# Altium footprint library Footprint_Vlad.PcbLib: 392 footprints (part 21 of 25)
Each footprint in its own frame and in the unit in brackets; x right, y up, seen from the top. Pads: shape width x height; smd on the part's side, far side on the other; paste and mask are expansions set on the pad; w line width, h text height; cw(c..) or ccw(c..) is an arc to the next point about the centre after c.
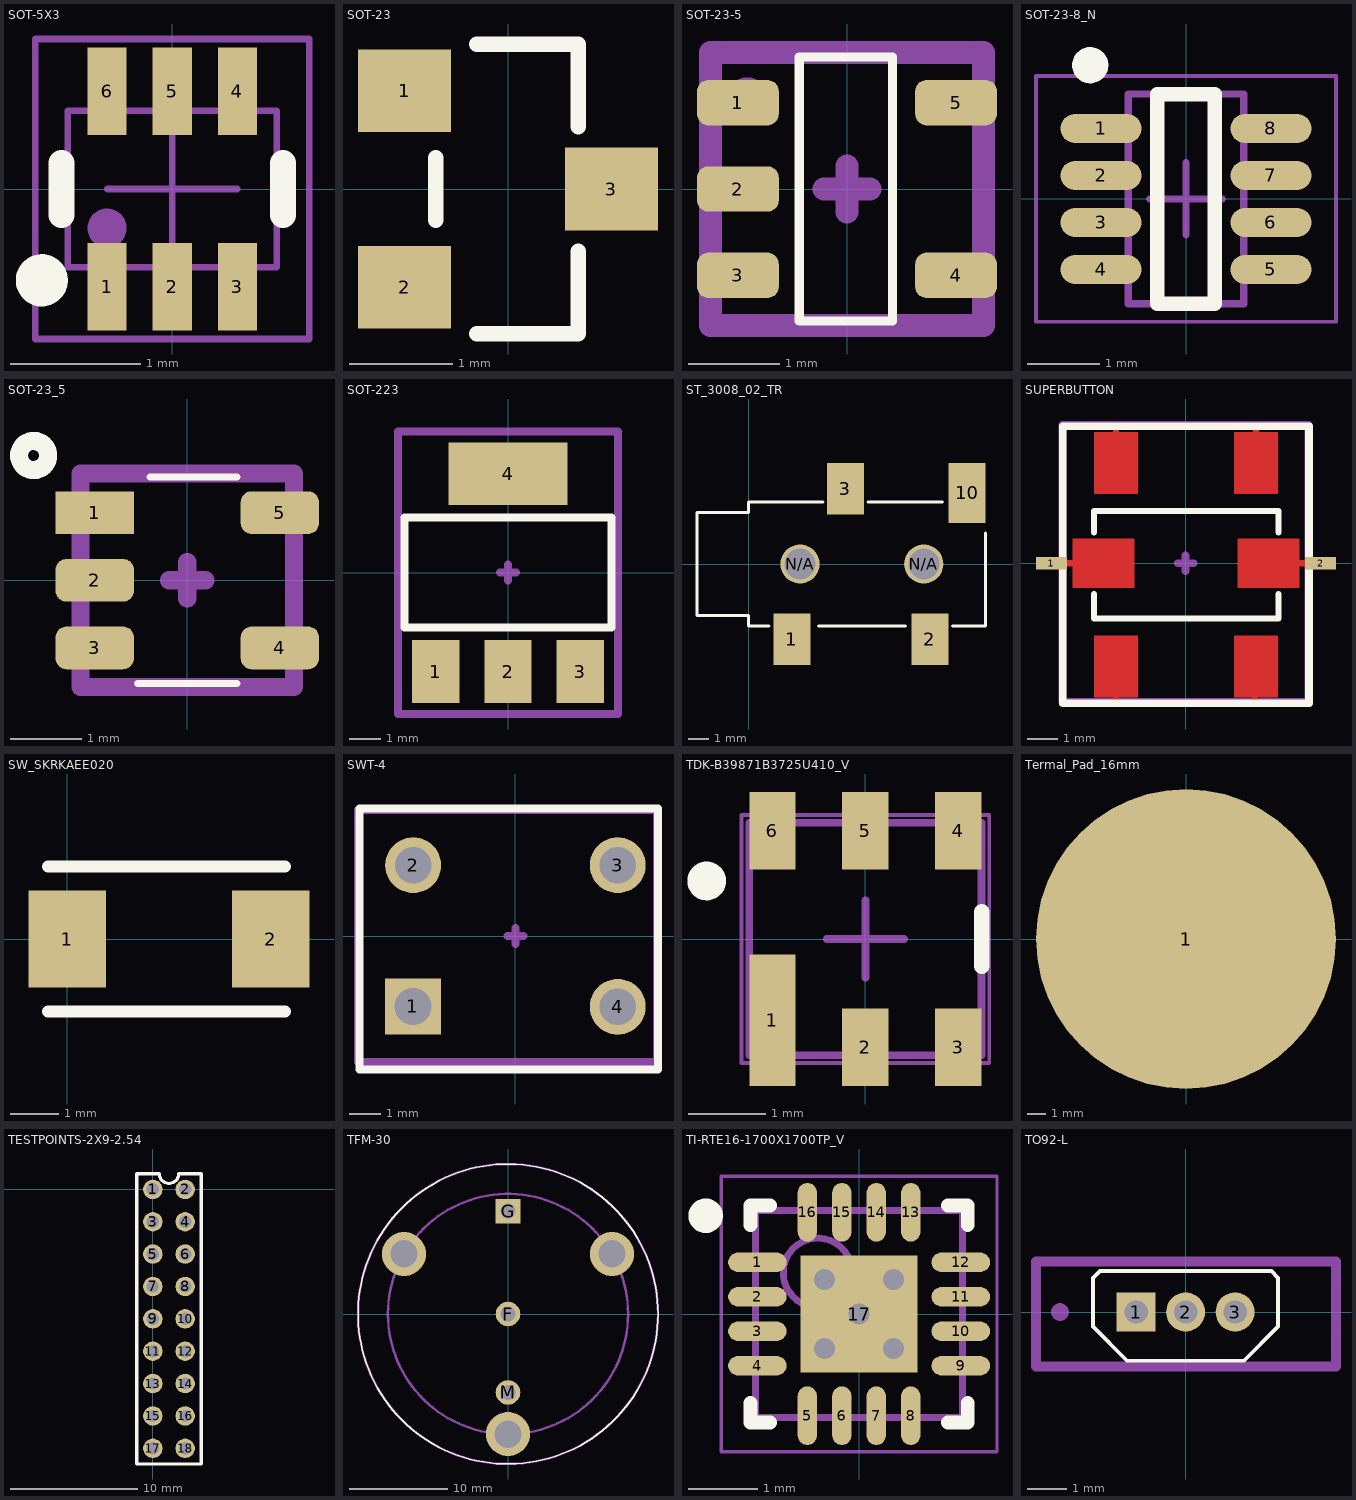
[diagram p20: the footprints below, top view; thin cyan lines are the x and y axes]

## SOT-5X3 [mm] "0.5 pitch"
height 0.6
pads (6):
  rect 0.3x0.67 smd: 1(-0.5,-0.75) 2(0,-0.75) 3(0.5,-0.75) 4(0.5,0.75) 5(0,0.75) 6(-0.5,0.75)
Top Overlay:
  circle w0.2: c-1,-0.7 r0.1
  lines w0.2: -0.85,-0.2 -0.85,0.2 ; 0.85,-0.2 0.85,0.2
Mechanical 13:
  circle w0.15: c-0.5,-0.3 r0.075
  lines w0.05: -0.61,-0.6 -0.61,-0.8 -0.39,-0.8 -0.39,-0.6 ; -0.61,0.6 -0.61,0.8 -0.39,0.8 -0.39,0.6 ; -0.11,-0.6 -0.11,-0.8 0.11,-0.8 0.11,-0.6 ; -0.11,0.6 -0.11,0.8 0.11,0.8 0.11,0.6 ; 0.39,-0.6 0.39,-0.8 0.61,-0.8 0.61,-0.6 ; 0.39,0.6 0.39,0.8 0.61,0.8 0.61,0.6 ; -0.8,-0.6 0.8,-0.6 0.8,0.6 -0.8,0.6 -0.8,-0.6
Mechanical 15:
  lines w0.05: -0.5,0 0.5,0 ; 0,-0.5 0,0.5 ; -1.05,-1.15 1.05,-1.15 1.05,1.15 -1.05,1.15 -1.05,-1.15
3D body "STEP-WE-TVS-HS-SOT563-rev1.stp": height 0.54, standoff -0.01, extent -0.8,-0.8 0.8,0.8

## SOT-23 [mm]
pads (3):
  rect 0.9x0.8 smd: 1(-1,0.95) 2(-1,-0.95) 3(1,0)
Top Overlay:
  lines w0.15: -0.7,-0.3 -0.7,0.3 ; -0.3,-1.4 0.65,-1.4 ; -0.3,1.4 0.65,1.4 ; 0.68,-1.4 0.68,-0.6 ; 0.68,0.6 0.68,1.4
Mechanical 15:
  circle w0.254: c-1,1 r0.1
3D body "CircuitWorks-SOT-23.step": height 1.05, standoff -0.05, extent -1.15,-1.45 1.35,1.55

## SOT-23-5 [mm]
pads (5):
  rrect50% 0.9x0.5 smd: 1(-1.2,0.95) 2(-1.2,0) 3(-1.2,-0.95) 4(1.2,-0.95) 5(1.2,0.95)
Top Overlay:
  lines w0.1: -0.525,-1.45 -0.525,1.45 0.5,1.45 0.5,-1.45 -0.525,-1.45
Mechanical 15:
  circle w0.254: c-1.1,1 r0.1
  lines w0.254: -0.254,0 0.254,0 ; 0,-0.254 0,0.254 ; -1.5,-1.5 1.5,-1.5 1.5,1.5 -1.5,1.5 -1.5,-1.5
  text ".Designator" at -1.6,1.9 h1.52
3D body "CircuitWorks-SOT-23-5.step": height 1.05, standoff -0.05, extent -1.25,-1.5 1.25,1.5

## SOT-23-8_N [mm] "SOT-23-8, 8-Leads, Body 2,90x1,60mm, Pitch 0,65mm, IPC Medium Density"
height 1.45
pads (8):
  oval 1.12x0.4 smd: 1(-1.175,0.975) 2(-1.175,0.325) 3(-1.175,-0.325) 4(-1.175,-0.975) 5(1.175,-0.975) 6(1.175,-0.325) 7(1.175,0.325) 8(1.175,0.975)
Top Overlay:
  circle w0.25: c-1.325,1.85 r0.125
  lines w0.2: -0.4,-1.45 0.4,-1.45 0.4,1.45 -0.4,1.45 -0.4,-1.45
Assembly Top:
  lines w0.1: -0.8,-1.45 0.8,-1.45 0.8,1.45 -0.8,1.45 -0.8,-1.45
Courtyard Top:
  lines w0.05: -2.075,-1.7 2.075,-1.7 2.075,1.7 -2.075,1.7 -2.075,-1.7
  lines w0.1: -0.5,0 0.5,0 ; 0,-0.5 0,0.5
3D body "TSOP65P280X145-8N.step": height 1.45, standoff -0.02, extent -1.5,-1.45 1.5,1.45

## SOT-23_5 [mm]
pads (5):
  rect 1.1x0.6 smd: 1(-1.3,0.95)
  rrect50% 1.1x0.6 smd: 2(-1.3,0) 3(-1.3,-0.95) 4(1.3,-0.95) 5(1.3,0.95)
Top Overlay:
  circle w0.254: c-2.159,1.753 r0.205
  lines w0.1: -0.7,-1.45 0.7,-1.45 ; -0.525,1.45 0.7,1.45
Mechanical 15:
  circle w0.254: c-1.1,1 r0.1
  lines w0.254: -0.254,0 0.254,0 ; 0,-0.254 0,0.254 ; -1.5,-1.5 -1.5,1.5 1.5,1.5 1.5,-1.5 -1.5,-1.5
  text ".Designator" at -1.6,1.9 h1.52
3D body "CircuitWorks-SOT-23-5.step": height 1.05, standoff -0.05, extent -1.25,-1.5 1.25,1.5

## SOT-223 [mm]
pads (4):
  rect 1.5x2 smd: 1(-2.3,-3.15) 2(0,-3.15) 3(2.3,-3.15)
  rect 3.8x2 smd: 4(0,3.15)
Top Overlay:
  lines w0.254: -3.3,-1.75 3.3,-1.75 3.3,1.75 -3.3,1.75 -3.3,-1.75
Mechanical 15:
  circle w0.254: c-2.3,-3 r0.224
  lines w0.254: -0.254,0 0.254,0 ; 0,-0.254 0,0.254 ; -3.5,-4.5 3.5,-4.5 3.5,4.5 -3.5,4.5 -3.5,-4.5
  text ".Designator" at -2.5,5 h1.52
3D body "CircuitWorks-SOT-223.step": height 1.65, standoff -0.03, extent -3.15,-3.68 3.35,3.28

## ST_3008_02_TR [mm]
pads (6):
  rect 1.8x2.5 smd: 1(2.1,-3.65) 2(8.8,-3.65) 3(4.7,3.65)
  rect 1.8x2.9 smd: 10(10.6,3.45)
  round 1.9 hole 1.5 unplated: N/A(2.5,0) N/A(8.5,0)
Top Overlay:
  lines w0.15: 1,-3 0,-3 0,-2.5 -2.5,-2.5 -2.5,2.5 0,2.5 0,3 3.6,3 ; 3.4,-3 7.6,-3 ; 5.8,3 9.4,3 ; 9.9,-3 11.5,-3 11.5,1.5

## SUPERBUTTON [mm]
pads (2):
  rect 1x0.4 smd: 1(-4.36,0) 2(4.39,0)
Top Layer:
  region: 1.69,0.8 1.69,-0.8 3.69,-0.8 3.69,0.8
  region: 1.59,4.25 1.59,2.25 2.99,2.25 2.99,4.25
  region: 1.59,-2.35 1.59,-4.35 2.99,-4.35 2.99,-2.35
  region: -3.66,0.8 -3.66,-0.8 -1.66,-0.8 -1.66,0.8
  region: -2.96,4.25 -2.96,2.25 -1.56,2.25 -1.56,4.25
  region: -2.96,-2.35 -2.96,-4.35 -1.56,-4.35 -1.56,-2.35
  lines w0.2: -4.01,4.4 -4.01,0 -4.01,-4.55 -2.26,-4.55 -2.26,-4.05 ; -4.01,4.45 -2.26,4.45 -2.26,3.9 ; -3.96,0 -3.46,0 ; 2.24,-4.05 2.24,-4.55 3.99,-4.55 3.99,0 3.54,0 ; 2.29,3.95 2.29,4.45 3.99,4.45 3.99,-0.05
Top Overlay:
  lines w0.2: -2.98,-1.8 -2.98,-1 ; -2.98,1 -2.98,1.7 ; -2.96,-1.8 3.02,-1.8 3.02,-1 ; -2.96,1.7 3.02,1.7 3.02,1
  lines w0.254: -3.99,-4.55 4.01,-4.55 4.01,4.45 -3.99,4.45 -3.99,-4.55
Top Paste:
  region: 1.79,0.7 1.79,-0.7 3.59,-0.7 3.59,0.7
  region: 1.69,4.15 1.69,2.35 2.89,2.35 2.89,4.15
  region: 1.69,-2.45 1.69,-4.25 2.89,-4.25 2.89,-2.45
  region: -3.56,0.7 -3.56,-0.7 -1.76,-0.7 -1.76,0.7
  region: -2.86,4.15 -2.86,2.35 -1.66,2.35 -1.66,4.15
  region: -2.86,-2.45 -2.86,-4.25 -1.66,-4.25 -1.66,-2.45
Top Solder:
  region: 1.79,0.7 1.79,-0.7 3.59,-0.7 3.59,0.7
  region: 1.69,4.15 1.69,2.35 2.89,2.35 2.89,4.15
  region: 1.69,-2.45 1.69,-4.25 2.89,-4.25 2.89,-2.45
  region: -3.56,0.7 -3.56,-0.7 -1.76,-0.7 -1.76,0.7
  region: -2.86,4.15 -2.86,2.35 -1.66,2.35 -1.66,4.15
  region: -2.86,-2.45 -2.86,-4.25 -1.66,-4.25 -1.66,-2.45
Mechanical 15:
  lines w0.254: -0.254,0 0.254,0 ; 0,-0.254 0,0.254 ; -4,-4.5 4,-4.5 4,4.5 -4,4.5 -4,-4.5
  text ".Designator" at -3,5 h1.52

## SW_SKRKAEE020 [mm]
pads (2):
  rect 1.6x2 smd: 1(0,0) 2(4.2,0)
Top Overlay:
  lines w0.25: -0.4,-1.5 4.5,-1.5 ; -0.4,1.5 4.5,1.5
3D body "User Library-Pushbutton3x4x2.step": height 2, standoff 0, extent -0.35,-1.45 4.55,1.45

## SWT-4 [mil]
pads (4):
  rect 70x70 hole 46: 1(-128.15,-88.19)
  round 70 hole 45.98: 2(-127.76,88.58) 3(128.15,88.58) 4(128.15,-88.58)
Top Overlay:
  lines w10: -195.08,159.06 -195.08,-166.93 178.15,-166.93 ; -195.08,159.45 178.54,159.45 ; 178.54,-166.93 178.54,159.06
Mechanical 15:
  lines w10: -10,0 10,0 ; 0,-10 0,10 ; -196.85,-157.48 -196.85,157.48 177.17,157.48 177.17,-157.48 -196.85,-157.48
  text ".Designator" at -137.8,177.17 h60

## TDK-B39871B3725U410_V [mm] "SMD, 6-Leads, Body 3x3mm"
height 1.1
pads (6):
  rect 0.6x1.7 smd: 1(-1.2,-1.05)
  rect 0.6x1 smd: 2(0,-1.4) 3(1.2,-1.4) 4(1.2,1.4) 5(0,1.4) 6(-1.2,1.4)
Top Overlay:
  circle w0.25: c-2.05,0.75 r0.125
  lines w0.2: 1.5,-0.35 1.5,0.35
Mechanical 13:
  lines w0.1: -1.5,-1.5 -1.5,1.5 1.5,1.5 1.5,-1.5 -1.5,-1.5
Mechanical 15:
  lines w0.05: -1.6,-1.6 1.6,-1.6 1.6,1.6 -1.6,1.6 -1.6,-1.6
  lines w0.1: -0.5,0 0.5,0 ; 0,-0.5 0,0.5
3D body: height 1.1, standoff 0, extent -1.5,-1.5 1.5,1.5

## Termal_Pad_16mm [mm]
pads (1):
  round 16 smd: 1(0,0)

## TESTPOINTS-2X9-2.54 [mil]
pads (18):
  round 60 hole 38: 1(0,0) 2(100,0) 3(0,-100) 4(100,-100) 5(0,-200) 6(100,-200) 7(0,-300) 8(100,-300) 9(0,-400) 10(100,-400) 11(0,-500) 12(100,-500) 13(0,-600) 14(100,-600) 15(0,-700) 16(100,-700) 17(0,-800) 18(100,-800)
Top Overlay:
  lines w10: -50,-848.43 -50,48.43 20,48.43 ccw(c50,48.43) 80,48.43 150,48.43 150,-848.43 -50,-848.43

## TFM-30 [mm] "Through Hole Circle, 3 pins, 3 mount holes"
height 20
pads (6):
  round 2.5 hole 1.5: F(0,0) M(0,-8)
  rect 2.5x2.5 hole 1.5: G(0,10.5)
  round 4.5 hole 2.8: ""(-10.609,6.125) ""(0,-12.25) ""(10.609,6.125)
Top Overlay:
  circle w0.15: c0,0 r15.3
Mechanical 15:
  circle w0.254: c0,0 r12.25
  circle w0.254: c0,0 r15.3
3D body: height 20, standoff 4, extent -15.3,-15.296 15.3,15.296
3D body: height 4, standoff 0, extent -1.494,-1.497 1.494,1.497
3D body: height 4, standoff 0, extent -1.494,9.003 1.494,11.997
3D body: height 4, standoff 0, extent -1.494,-9.497 1.494,-6.503
3D body: height 4, standoff -3.5, extent 9.468,4.977 11.759,7.273
3D body: height 4, standoff -3.5, extent -1.141,-13.398 1.15,-11.102
3D body: height 4.35, standoff -3.15, extent -11.75,4.977 -9.459,7.273
3D body: height 0, standoff -3.5, extent -0.498,10.001 0.498,10.999
3D body: height 0, standoff -3.5, extent -0.498,-0.499 0.498,0.499
3D body: height 0, standoff -3.5, extent -0.498,-8.499 0.498,-7.501

## TI-RTE16-1700X1700TP_V [mm] "QFN, 16-Leads, Body 3x3mm, Pitch 0.5mm, Thermal Pad 1.7x1.7mm"
height 0.8
pads (17):
  oval 0.85x0.28 smd: 1(-1.475,0.75) 2(-1.475,0.25) 3(-1.475,-0.25) 4(-1.475,-0.75) 9(1.475,-0.75) 10(1.475,-0.25) 11(1.475,0.25) 12(1.475,0.75)
  oval 0.28x0.85 smd: 5(-0.75,-1.475) 6(-0.25,-1.475) 7(0.25,-1.475) 8(0.75,-1.475) 13(0.75,1.475) 14(0.25,1.475) 15(-0.25,1.475) 16(-0.75,1.475)
  rect 1.7x1.7 smd: 17(0,0)
via 0,0 diameter 0.6 hole 0.3
via -0.5,-0.5 diameter 0.6 hole 0.3
via -0.5,0.5 diameter 0.6 hole 0.3
via 0.5,0.5 diameter 0.6 hole 0.3
via 0.5,-0.5 diameter 0.6 hole 0.3
Top Overlay:
  circle w0.25: c-2.225,1.425 r0.125
  lines w0.2: -1.575,-1.29 -1.575,-1.575 -1.29,-1.575 ; -1.575,1.29 -1.575,1.575 -1.29,1.575 ; 1.29,-1.575 1.575,-1.575 1.575,-1.29 ; 1.29,1.575 1.575,1.575 1.575,1.29
Mechanical 13:
  circle w0.1: c-0.6,0.6 r0.5
  lines w0.1: -1.5,-1.5 1.5,-1.5 1.5,1.5 -1.5,1.5 -1.5,-1.5
Mechanical 15:
  lines w0.05: -2,-2 2,-2 2,2 -2,2 -2,-2
  lines w0.1: -0.5,0 0.5,0 ; 0,-0.5 0,0.5
3D body "TI-RTE16-1700X1700TP_V.step": height 0.74, standoff 0, extent -1.626,-1.626 1.626,1.626

## TO92-L [mm]
pads (3):
  rect 1x1 hole 0.6: 1(-1.27,0)
  round 1 hole 0.6: 2(0,0) 3(1.27,0)
Top Overlay:
  lines w0.1: -2.375,-0.375 -1.5,-1.25 1.5,-1.25 2.375,-0.375 2.375,0.875 2.2,1.05 -2.2,1.05 -2.375,0.875 -2.375,-0.375
Mechanical 15:
  circle w0.254: c-3.225,0 r0.1
  lines w0.254: -3.84,-1.4 -3.84,1.3 3.86,1.3 3.86,-1.4 -3.84,-1.4
  text ".Designator" at -3.74,1.6 h1.52
3D body "User Library-PN2907A Transistors PNP TO-92 3L (2,54mm).step": height 19.32, standoff -0.2, extent -2.38,-1.45 2.38,2.18